# Altium schematic symbol library Switch.SchLib: 116 symbols (part 1 of 2)
Pins are listed as number, name and electrical type; pins without a type are passive.

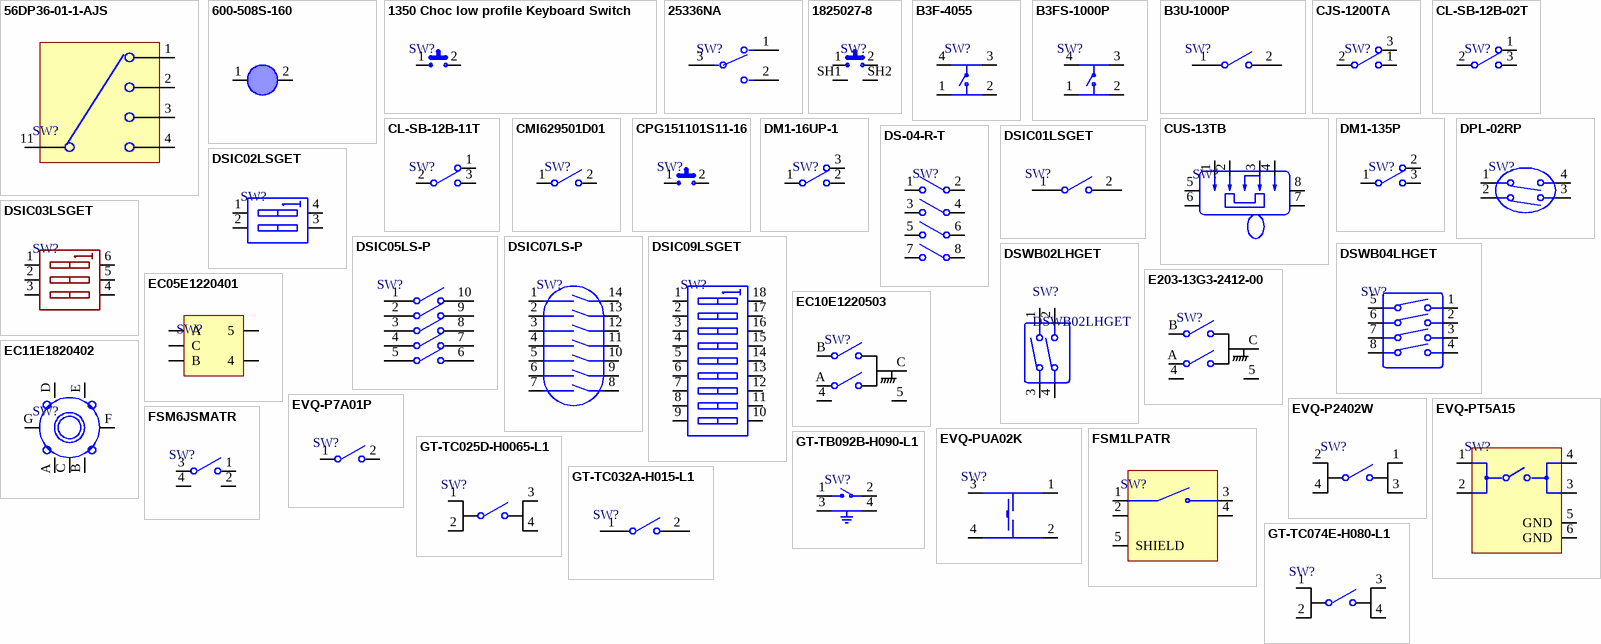
[diagram p0: symbols 56DP36-01-1-AJS to GT-TC074E-H080-L1]

## 56DP36-01-1-AJS
designator SW?
2 - 10 positions 36deg Rotary Switch; 115 V ac; 30 V dc; 200 mA; Shaft; Manufacturer: Grayhill; Manufacturer Part Number: 56DP36-01-1-AJS; Item Type: Rotary Switches; Supplier: Digikey; Supplier Part Number: 56DP36-01-1-AJS-ND; RoHS: Yes; Pricing: 1=24.84, 5=21.334, 10=19.997, 25=18.3256, 50=17.156, 100=16.0977, 250=14.76088, 500=14.4824 (USD); ComponentLink1URL: https://datasheet.ciiva.com/2887/rotary-56-2887598.pdf?src-supplier=Digikey; ComponentLink1Description: https://datasheet.ciiva.com/2887/rotary-56-2887598.pdf?src-supplier=Digikey
footprint 56DP36-01-1-AJS
pins: 1, 2, 3, 4, 11 COMMON

## 600-508S-160
designator J?
Circular 160gf 0.25mm - Metal Dome Pot ROHS; Manufacturer: HYP; Manufacturer Part Number: 600-508S-160; Package: Custom; LCSC Part Number: C256262; Item Type: Metal Dome Pot; ComponentLink1Description: LCSC; ComponentLink1URL: https://www.lcsc.com/product-detail/Metal-span-style-background-color-ff0-Dome-span-Pot_HYP-Hongyuan-Precision-600-508S-160_C256262.html
footprint 600-508S-160
pins: 1, 2

## 1350 Choc low profile Keyboard Switch
designator SW?
Mechnical Keyboard Switches Hot-swap PCB Socket DIY for 1350 Choc Low Profile Keyboard Switch; Manufacturer: Kailh; Manufacturer Part Number: 1350 Choc low profile Keyboard Switch; Package: -; LCSC Part Number: -; Item Type: Keyboard Switch; ComponentLink1Description: LCSC; ComponentLink1URL: *
footprint 1350 Choc low profile Keyboard Switch
pins: 1, 2

## 25336NA
designator SW?
SWITCH SLIDE SPDT 4A 125V; Manufacturer: APEM; Manufacturer Part Number: 25336NA; Item Type: Slide Switches; Actuator Length: 2.3mm; Actuator Material: Glass, Glass fibre, Nylon, Polyamide; Contact Current Rating: 2A; Contact Resistance: 10mΩ; Contact Voltage Rating (AC): 250V; Current Rating: 1A; Dielectric Material: Thermoplastic; Electrical Life: 10kcycles; Insulation Resistance: 1GΩ; Max Voltage Rating (DC): 30V; Mechanical Life: 20kcycles; Number of Positions: 2; Sealable: EPOXY TERMINAL SEALED; Switch Function: On-On; Switch Travel: 4mm; Supplier: Arrow Electronics; Supplier Part Number: 25336NA; RoHS: Compliant; Stock: 4; Pricing: 1=2.2457 (USD); Contact Material: Silver; Contact Plating: Silver; Depth: 9.8mm; Height: 8.1mm; Length: 14.1mm; Life (Cycles): 10kcycles; Lifecycle Status: Production; Max Current Rating: 1A; Max Operating Temperature: 85°C; Max Voltage Rating (AC): 250V; Min Operating Temperature: -40°C; Mounting Technology: Through Hole; Orientation: Right Angle; Packaging: Bulk; REACH SVHC: Yes; Terminal Material: Silver; Termination: PC Pin; Throw Configuration: SPDT; Voltage Rating (AC): 125V; Voltage Rating (DC): 30V; Width: 14mm; ComponentLink1URL: https://datasheet.octopart.com:443/25336NA-APEM-datasheet-13521368.pdf?src-supplier=IHS; ComponentLink1Description: https://datasheet.octopart.com:443/25336NA-APEM-datasheet-13521368.pdf?src-supplier=IHS; ComponentLink2URL: https://datasheet.octopart.com:443/25336NA-APEM-datasheet-41567066.pdf?src-supplier=Master+Electronics; ComponentLink2Description: https://datasheet.octopart.com:443/25336NA-APEM-datasheet-41567066.pdf?src-supplier=Master+Electronics; ComponentLink3URL: https://datasheet.octopart.com:443/25336NA-APEM-datasheet-178036094.pdf?src-supplier=TME; ComponentLink3Description: https://datasheet.octopart.com:443/25336NA-APEM-datasheet-178036094.pdf?src-supplier=TME; ComponentLink4URL: https://datasheet.octopart.com:443/25336NA-APEM-datasheet-10337772.pdf?src-supplier=Newark; ComponentLink4Description: https://datasheet.octopart.com:443/25336NA-APEM-datasheet-10337772.pdf?src-supplier=Newark; ComponentLink5URL: https://datasheet.octopart.com:443/25336NA-APEM-datasheet-23707371.pdf?src-supplier=Electro+Sonic; ComponentLink5Description: https://datasheet.octopart.com:443/25336NA-APEM-datasheet-23707371.pdf?src-supplier=Electro+Sonic; ComponentLink6URL: https://datasheet.octopart.com:443/25336NA-APEM-datasheet-165057810.pdf?src-supplier=Burklin+Elektronik; ComponentLink6Description: https://datasheet.octopart.com:443/25336NA-APEM-datasheet-165057810.pdf?src-supplier=Burklin+Elektronik; ComponentLink7URL: https://datasheet.octopart.com:443/25336NA-APEM-datasheet-491718.pdf?src-supplier=Factory+Futures; ComponentLink7Description: https://datasheet.octopart.com:443/25336NA-APEM-datasheet-491718.pdf?src-supplier=Factory+Futures
footprint 25336NA
pins: 1, 2, 3 Common

## 1825027-8
designator SW?
50mA Lying SPST 24V Plugin Tactile Switches ROHS; Manufacturer: TE Connectivity; Manufacturer Part Number: 1825027-8; Supplier 1: Arrow Electronics; RoHS: Yes; Category: Pushbutton Switches; Stock 1: 178529; Pricing 1: 1=0.13800, 10=0.13370, 25=0.12590, 100=0.10940, 250=0.10570, 500=0.09520, 1000=0.07320, 2500=0.07250, 5000=0.06250 (USD); ComponentLink1URL: https://datasheet.ciiva.com/30072/eng-cd-1825027-f-30072833.pdf?src-supplier=Onlinecomponents.com; ComponentLink1Description: https://datasheet.ciiva.com/30072/eng-cd-1825027-f-30072833.pdf?src-supplier=Onlinecomponents.com; ComponentLink2URL: https://datasheet.ciiva.com/16393/1825027-8-16393346.pdf?src-supplier=Future+Electronics; ComponentLink2Description: https://datasheet.ciiva.com/16393/1825027-8-16393346.pdf?src-supplier=Future+Electronics; ComponentLink3URL: https://datasheet.ciiva.com/8164/eng-cd-1825027-g4-8164921.pdf?src-supplier=Avnet; ComponentLink3Description: https://datasheet.ciiva.com/8164/eng-cd-1825027-g4-8164921.pdf?src-supplier=Avnet; Supplier Part Number 1: 1825027-8; Item Type: Tactile Switch
footprint 1825027-8
pins: 1, 2, SH1 GND, SH2 GND

## B3F-4055
designator SW?
SWITCH TACTILE SPST-NO 0.05A 24V; Manufacturer: Omron; Manufacturer Part Number: B3F-4055; Item Type: Tactile Switche; Number of Positions: 2NUMBER; Supplier: Avnet; Supplier Part Number: 36K1872; RoHS: Yes; Stock: 55; Pricing: 1=0.617, 10=0.574, 25=0.55, 50=0.525, 100=0.501 (USD); Color: 54Colour; Lead Free: 5697LeadFree; ComponentLink1URL: https://datasheet.ciiva.com/27056/2086688-27056647.pdf?src-supplier=Jameco; ComponentLink1Description: https://datasheet.ciiva.com/27056/2086688-27056647.pdf?src-supplier=Jameco; ComponentLink2URL: https://datasheet.ciiva.com/5283/b3f-0811-26083-5283663.pdf?src-supplier=Mouser; ComponentLink2Description: https://datasheet.ciiva.com/5283/b3f-0811-26083-5283663.pdf?src-supplier=Mouser; ComponentLink3URL: https://datasheet.ciiva.com/1532/611570-1532596.pdf?src-supplier=Element14; ComponentLink3Description: https://datasheet.ciiva.com/1532/611570-1532596.pdf?src-supplier=Element14; ComponentLink4URL: https://datasheet.ciiva.com/16154/en-b3f-16154911.pdf?src-supplier=Onlinecomponents.com; ComponentLink4Description: https://datasheet.ciiva.com/16154/en-b3f-16154911.pdf?src-supplier=Onlinecomponents.com; ComponentLink5URL: https://datasheet.ciiva.com/2900/b3f-0811-2900013.pdf?src-supplier=Digikey; ComponentLink5Description: https://datasheet.ciiva.com/2900/b3f-0811-2900013.pdf?src-supplier=Digikey; ComponentLink6URL: https://datasheet.ciiva.com/30212/en-b3f-30212214.pdf?src-supplier=Onlinecomponents.com; ComponentLink6Description: https://datasheet.ciiva.com/30212/en-b3f-30212214.pdf?src-supplier=Onlinecomponents.com; LCSC Part Number: C84931
footprint B3F-4055
pins: 1, 2, 3, 4

## B3FS-1000P
designator SW?
SWITCH TACTILE SPST-NO 0.05A 24V; Manufacturer: Omron; Manufacturer Part Number: B3FS-1000P; Item Type: Tactile Switches; Number of Positions: 2NUMBER; Supplier: Digikey; LCSC Part Number: C271750; RoHS: Yes; Stock: 40780; Pricing: 1=0.65, 10=0.576, 25=0.524, 100=0.4714, 250=0.45424, 500=0.43708, 1000=0.392 (USD); Material: 4239ConductorMaterial; Color: 46Colour; Lead Free: 5697LeadFree; ComponentLink1URL: https://datasheet.ciiva.com/1532/en-b3fs-1532627.pdf?src-supplier=Element14; ComponentLink1Description: https://datasheet.ciiva.com/1532/en-b3fs-1532627.pdf?src-supplier=Element14; ComponentLink2URL: https://datasheet.ciiva.com/16154/en-b3fs-16154936.pdf?src-supplier=Onlinecomponents.com; ComponentLink2Description: https://datasheet.ciiva.com/16154/en-b3fs-16154936.pdf?src-supplier=Onlinecomponents.com; ComponentLink3URL: https://datasheet.ciiva.com/2899/en-b3fs-2899744.pdf?src-supplier=Digikey; ComponentLink3Description: https://datasheet.ciiva.com/2899/en-b3fs-2899744.pdf?src-supplier=Digikey; ComponentLink4URL: https://datasheet.ciiva.com/2899/en-b3fs-2899745.pdf?src-supplier=Digikey; ComponentLink4Description: https://datasheet.ciiva.com/2899/en-b3fs-2899745.pdf?src-supplier=Digikey; ComponentLink5URL: https://datasheet.ciiva.com/2899/en-b3fs-2899746.pdf?src-supplier=Digikey; ComponentLink5Description: https://datasheet.ciiva.com/2899/en-b3fs-2899746.pdf?src-supplier=Digikey; ComponentLink6URL: https://datasheet.ciiva.com/26827/getdatasheetpartid-131603-26827237.pdf?src-supplier=Verical; ComponentLink6Description: https://datasheet.ciiva.com/26827/getdatasheetpartid-131603-26827237.pdf?src-supplier=Verical; ComponentLink7URL: https://datasheet.ciiva.com/30214/b3fs-0714-30214221.pdf?src-supplier=Onlinecomponents.com; ComponentLink7Description: https://datasheet.ciiva.com/30214/b3fs-0714-30214221.pdf?src-supplier=Onlinecomponents.com
footprint B3FS-1000P
pins: 1, 2, 3, 4

## B3U-1000P
designator SW?
SWITCH TACTILE SPST-NO 0.05A 12V; Manufacturer: Omron; Manufacturer Part Number: B3U-1000P; Mechanical Life: 200000Cycles; Operating Force: 1.5N; Throw Configuration: SPST; Current Rating: 50mA; Contact Resistance: 100mR; Illumination Type: Non-Illuminated,Illuminated; Switch Travel: 0.15mm; Switch Function: Off-Mom; Actuator Type: Standard; Actuator Length: 0.4mm; Ratings: Dust Proof,IP40; ComponentLink1URL: http://www.farnell.com/datasheets/60838.pdf?src-supplier=Farnell; ComponentLink1Description: http://www.farnell.com/datasheets/60838.pdf?src-supplier=Farnell; ComponentLink2URL: http://www.farnell.com/datasheets/60838.pdf?src-supplier=Element14; ComponentLink2Description: http://www.farnell.com/datasheets/60838.pdf?src-supplier=Element14; ComponentLink3URL: https://omronfs.omron.com/en_US/ecb/products/pdf/en-b3u.pdf?src-supplier=Digi-Key; ComponentLink3Description: https://omronfs.omron.com/en_US/ecb/products/pdf/en-b3u.pdf?src-supplier=Digi-Key; ComponentLink4URL: http://www.omron.com/ecb/products/pdf/en-b3u.pdf?src-supplier=Digi-Key; ComponentLink4Description: http://www.omron.com/ecb/products/pdf/en-b3u.pdf?src-supplier=Digi-Key; ComponentLink5URL: https://www.distrelec.biz/Web/Downloads/he/et/B3U_eng_datasheet.pdf?mime=application%2Fpdf&src-supplier=Distrelec; ComponentLink5Description: https://www.distrelec.biz/Web/Downloads/he/et/B3U_eng_datasheet.pdf?mime=application%2Fpdf&src-supplier=Distrelec; ComponentLink6URL: http://www.onlinecomponents.com/productFiles/mf-OM/en-b3u.pdf?src-supplier=Onlinecomponents.com; ComponentLink6Description: http://www.onlinecomponents.com/productFiles/mf-OM/en-b3u.pdf?src-supplier=Onlinecomponents.com; Supplier 1: Digi-Key; Stock 1: 116454; Pricing 1: 1=1, 10=0.961, 25=0.9064, 50=0.7976, 100=0.7251, 250=0.68888, 500=0.67074, 1000=0.52571 (USD); Mount: Surface Mount; Weight: 0.000776oz; Contact Material: Silver; Min Operating Temperature: -25°C; Max Operating Temperature: 70°C; Packaging: Tape and Reel; Voltage Rating (DC): 12V; Package Quantity: 1; Max Current Rating: 50mA; Termination: SMD/SMT; Orientation: Straight; Max Voltage Rating (DC): 12V; Electrical Life: 200000Cycles; Insulation Resistance: 100MR; Contact Current Rating: 50mA; Length: 4mm; Height: 1.2mm; Depth: 2.5mm; Width: 3mm; REACH SVHC: Unknown; Lead Free: Lead Free; ComponentLink7URL: https://www.verical.com/server-webapp/html/getDatasheet?partID=552554&src-supplier=Verical; ComponentLink7Description: https://www.verical.com/server-webapp/html/getDatasheet?partID=552554&src-supplier=Verical; ComponentLink8URL: http://www.farnell.com/datasheets/1685550.pdf?src-supplier=Element14; ComponentLink8Description: http://www.farnell.com/datasheets/1685550.pdf?src-supplier=Element14; ComponentLink9URL: http://www.farnell.com/datasheets/2610940.pdf?src-supplier=Farnell; ComponentLink9Description: http://www.farnell.com/datasheets/2610940.pdf?src-supplier=Farnell; ComponentLink10URL: https://www.alliedelec.com/m/d/4c8a9ef82804fc3c241a13c1e298fd73.pdf?src-supplier=Allied+Electronics; ComponentLink10Description: https://www.alliedelec.com/m/d/4c8a9ef82804fc3c241a13c1e298fd73.pdf?src-supplier=Allied+Electronics; Supplier Part Number 1: SW1020DKR-ND; LCSC Part Number: C231329; Item Type: Switch
footprint B3U-1000P (SWITCH TACTILE SPST-NO 0.05A 12V)
pins: 1, 2

## CJS-1200TA
designator SW?
SWITCH SLIDE SPDT 100MA 6V; Manufacturer: Nidec Copal; Manufacturer Part Number: CJS-1200TA; Item Type: DIP Switches; Actuator Material: Nylon,Polyamide; Electrical Life: 200Cycles; Max Voltage Rating (DC): 24V; Switch Function: On-On; Switch Travel: 0.6mm; Operating Force: 600gf; Supplier: Digikey; RoHS: Yes; Stock: 28637; Pricing: 1=1.12, 10=0.915, 25=0.8424, 100=0.7418, 250=0.68124, 500=0.63826 (USD); Mounting Technology: Surface Mount; Contact Material: Copper Alloy; Contact Plating: Gold; Min Operating Temperature: -40°C; Max Operating Temperature: 85°C; Packaging: Tape and Reel; Throw Configuration: SPDT; Voltage Rating (DC): 6V; Termination: J-Hook; Series: CJS; Orientation: Vertical; Contact Current Rating: 100mA; Radiation Hardening: No; RoHS Compliant: Yes; Lead Free: Lead Free; ComponentLink1URL: https://datasheet.ciiva.com/2864/cjs-2864477.pdf?src-supplier=Digikey; ComponentLink1Description: https://datasheet.ciiva.com/2864/cjs-2864477.pdf?src-supplier=Digikey; ComponentLink2URL: https://datasheet.ciiva.com/2864/cjs-2864476.pdf?src-supplier=Digikey; ComponentLink2Description: https://datasheet.ciiva.com/2864/cjs-2864476.pdf?src-supplier=Digikey; ComponentLink3URL: https://datasheet.ciiva.com/2864/cjs-2864478.pdf?src-supplier=Digikey; ComponentLink3Description: https://datasheet.ciiva.com/2864/cjs-2864478.pdf?src-supplier=Digikey
footprint CJS-1200TA
pins: 1 NC, 2 COM, 3 NO

## CL-SB-12B-02T
designator SW?
SWITCH SLIDE SPDT 200MA 12V; Manufacturer: Nidec Copal; Manufacturer Part Number: CL-SB-12B-02T; Actuator Material: Nylon,Polyamide; Operating Force: 153gf; Electrical Life: 10000Cycles; Switch Travel: 2mm; Switch Function: On-On; Actuator Type: Standard; Item Type: Slide Switche; Supplier: Digikey; Supplier Part Number: 563-1319-1-ND; RoHS: Yes; Category: Slide Switches; Stock: 2449; Pricing: 1=1.67, 10=1.62, 25=1.4732, 100=1.2799, 250=1.15988 (USD); Mounting Technology: Surface Mount; Contact Material: Copper; Contact Plating: Gold; Min Operating Temperature: -40°C; Max Operating Temperature: 85°C; Packaging: Cut Tape; Voltage Rating (DC): 12V; Termination: Gull Wing; Throw Configuration: SPDT; Series: CL-SB; Actuator Length: 2mm; RoHS Compliant: Yes; ComponentLink1URL: https://datasheet.ciiva.com/6461/cl-sb-6461724.pdf?src-supplier=Digikey; ComponentLink1Description: https://datasheet.ciiva.com/6461/cl-sb-6461724.pdf?src-supplier=Digikey; ComponentLink2URL: https://datasheet.ciiva.com/6461/cl-sb-6461725.pdf?src-supplier=Digikey; ComponentLink2Description: https://datasheet.ciiva.com/6461/cl-sb-6461725.pdf?src-supplier=Digikey; ComponentLink3URL: https://datasheet.ciiva.com/6461/cl-sb-6461726.pdf?src-supplier=Digikey; ComponentLink3Description: https://datasheet.ciiva.com/6461/cl-sb-6461726.pdf?src-supplier=Digikey; LCSC Part Number: C2921648
footprint CL-SB-12B-02T
pins: 1 NC, 2 COM, 3 NO

## CL-SB-12B-11T
designator SW?
SWITCH SLIDE SPDT 200MA 12V; Manufacturer: Nidec Copal; Manufacturer Part Number: CL-SB-12B-11T; Item Type: Slide Switches; Actuator Material: Nylon,Polyamide; Operating Force: 153gf; Electrical Life: 10000Cycles; Switch Travel: 2mm; Switch Function: On-On; Actuator Type: Standard; Supplier: Digikey; Supplier Part Number: 563-1320-1-ND; RoHS: Yes; Stock: 4269; Pricing: 1=1.26, 10=1.212, 25=1.1392, 100=0.9841, 250=0.89688 (USD); Mounting Technology: Surface Mount; Contact Material: Copper; Contact Plating: Silver; Min Operating Temperature: -40°C; Max Operating Temperature: 85°C; Packaging: Cut Tape; Voltage Rating (DC): 12V; Termination: Gull Wing; Throw Configuration: SPDT; Series: CL-SB; Actuator Length: 2mm; RoHS Compliant: Yes; ComponentLink1URL: https://datasheet.ciiva.com/6462/cl-sb-6462038.pdf?src-supplier=Digikey; ComponentLink1Description: https://datasheet.ciiva.com/6462/cl-sb-6462038.pdf?src-supplier=Digikey
footprint CL-SB-12B-11T
pins: 1 NC, 2 COM, 3 NO

## CMI629501D01
designator SW?
Plugin Tactile Switches ROHS; Manufacturer: Kailh; Manufacturer Part Number: CMI629501D01; Package: Plugin; LCSC Part Number: C400267; Item Type: Tactile Switch; ComponentLink1Description: LCSC; ComponentLink1URL: https://www.lcsc.com/product-detail/Tactile-Switches_span-style-background-color-ff0-Kailh-span-CMI629501D01_C400267.html
footprint CMI629501D01
pins: 1, 2

## CPG151101S11-16
designator SW?
SMD,14.5x5.9mm Mechanical Keyboard Shaft ROHS; Manufacturer: HanElectricity; Manufacturer Part Number: CPG151101S11-16; Package: SMD,14.5x5.9mm; LCSC Part Number: C41430893; Item Type: Mechanical Keyboard Shaft; ComponentLink1Description: LCSC; ComponentLink1URL: https://www.lcsc.com/product-detail/Mechanical-Keyboard-Shaft_HanElectricity-CPG151101S11-16_C41430893.html?s_z=n_%2520CPG151101S11-16
footprint CPG151101S11-16
pins: 1, 2

## CUS-13TB
designator SW?
SWITCH SLIDE SP3T 300MA 4V; Manufacturer: Nidec Copal; Manufacturer Part Number: CUS-13TB; Item Type: Slide Switches; Actuator Material: Nylon,Polyamide; Max Voltage Rating (DC): 20V; Electrical Life: 10000Cycles; Switch Travel: 1.5mm; Switch Function: On-On-On; Actuator Type: Standard; Supplier: Rs; LCSC Part Number: C2921740; RoHS: Yes; Stock: 2445; Mounting Technology: Surface Mount; Contact Plating: Gold; Contact Material: Copper Alloy; Min Operating Temperature: -20°C; Max Operating Temperature: 70°C; Voltage Rating (DC): 4V; Packaging: Tape and Reel; Termination: Gull Wing; Throw Configuration: SP3T; Orientation: Right Angle; Series: CUS; Actuator Length: 1.5mm; Radiation Hardening: No; RoHS Compliant: Yes; ComponentLink1URL: https://datasheet.ciiva.com/2889/cus-2889142.pdf?src-supplier=Digikey; ComponentLink1Description: https://datasheet.ciiva.com/2889/cus-2889142.pdf?src-supplier=Digikey; ComponentLink2URL: https://datasheet.ciiva.com/2889/cus-2889143.pdf?src-supplier=Digikey; ComponentLink2Description: https://datasheet.ciiva.com/2889/cus-2889143.pdf?src-supplier=Digikey; ComponentLink3URL: https://datasheet.ciiva.com/2889/cus-2889144.pdf?src-supplier=Digikey; ComponentLink3Description: https://datasheet.ciiva.com/2889/cus-2889144.pdf?src-supplier=Digikey
footprint CUS-13TB
pins: 1, 2, 3, 4, 5, 6, 7, 8

## DM1-16UP-1
designator SW?
1A 30V SPDT Micro Switch 1000000 times Plugin Microswitches ROHS; Manufacturer: XKB Connectivity; Manufacturer Part Number: DM1-16UP-1; Package: Plugin; LCSC Part Number: C405950; Item Type: Switch; ComponentLink1Description: LCSC; ComponentLink1URL: https://www.lcsc.com/product-detail/Microswitches_XKB-Connectivity-DM1-16UP-1_C405950.html
footprint DM1-16UP-1
pins: 1 COM, 2 NO, 3 NC

## DM1-135P
designator SW?
1A 30V Single Pole Double Throw (SPDT) 1,000,000 Times Plugin Limit Switches ROHS; Manufacturer: XKB Connectivity; Manufacturer Part Number: DM1-135P; Item Type: Switch; Package: Plugin; LCSC Part Number: C480264; ComponentLink1Description: LCSC; ComponentLink1URL: https://www.lcsc.com/product-detail/Limit-Switches_XKB-Connection-DM1-135P_C480264.html
footprint DM1-135P
pins: 1 COM, 2 NC, 3 NO

## DPL-02RP
designator SW?
2 positions SPST 24V 25mA Red 3000 Times Piano Key Plugin DIP Switches ROHS; Manufacturer: XKB Connection; Manufacturer Part Number: DPL-02RP; Item Type: SMD-4P; Package: Plugin; LCSC Part Number: C319071; ComponentLink1Description: LCSC; ComponentLink1URL: https://www.lcsc.com/product-detail/DIP-Switches_XKB-Connection-DPL-02RP_C319071.html
footprint DPL-02RP
pins: 1, 2, 3, 4

## DS-04-R-T
designator SW?
4Bit SPST 24V Red 25mA 3000次 Plugin DIP Switches ROHS; Manufacturer: kangshen; Manufacturer Part Number: 208-4; Package: Plugin; LCSC Part Number: C5123702; Item Type: DIP Switch; ComponentLink1Description: LCSC; ComponentLink1URL: https://www.lcsc.com/product-detail/DIP-Switches_CTS-Electronic-Components-208-4_C3012341.html
footprint DS-04-R-T
pins: 1, 2, 3, 4, 5, 6, 7, 8

## DSIC01LSGET
designator SW?
SPST Black Flat dial, raised type 2.54mm 1 SMD,2.5x6mm DIP Switches ROHS; Manufacturer: DongGuan; Manufacturer Part Number: DSIC01LSGET; Item Type: Switch; Package: SMD,2.5x6mm; LCSC Part Number: C54948; ComponentLink1Description: LCSC; ComponentLink1URL: https://www.lcsc.com/product-detail/DIP-Switches_DongGuan-KINGTEK-Industrial-Co-LTD-DSIC01LSGET_C54948.html
footprint DSIC01LSGET
pins: 1, 2

## DSIC02LSGET
designator SW?
2 positions SPST Black Flat Toggle, Raised Style SMD-4P,5.1x6mm DIP Switches ROHS; Manufacturer: DongGuan; Manufacturer Part Number: DSIC02LSGET; Item Type: Switch; Package: SMD-4P,5.1x6mm; LCSC Part Number: C54949; ComponentLink1Description: LCSC; ComponentLink1URL: https://www.lcsc.com/product-detail/DIP-Switches_DongGuan-KINGTEK-Industrial-Co-LTD-DSIC02LSGET_C54949.html?s_z=n_DSIC02LSGET
footprint DSIC02LSGET
pins: 1 A1, 2 A2, 3 A3, 4 B3

## DSIC03LSGET
designator SW?
3 positions SPST Black Flat Toggle, Raised Style SMD-6P,6x7.6mm DIP Switches ROHS; Manufacturer: DongGuan KINGTEK Industrial Co.,LTD; Manufacturer Part Number: DSIC03LSGET; Package: SMD-6P,6x7.6mm; LCSC Part Number: C57453; Item Type: DIP Switches; ComponentLink1Description: LCSC; ComponentLink1URL: https://www.lcsc.com/product-detail/DIP-Switches_DongGuan-KINGTEK-Industrial-Co-LTD-DSIC03LSGET_C57453.html
footprint DSIC03LSGET
pins: 1 A1, 2 A2, 3 A3, 4 B3, 5 B2, 6 B1

## DSIC05LS-P
designator SW?
Gull Wing SPST 24V 25mA Black -20℃~+70℃ 3000 Flat dial, raised type 2.54mm 5 SMD-10P,6x12.6mm DIP Switches ROHS; Manufacturer: XKB Connectivity; Manufacturer Part Number: DSIC05LS-P; Item Type: Switch; LCSC Part Number: C319036; ComponentLink1Description: LCSC; ComponentLink1URL: https://www.lcsc.com/product-detail/DIP-Switches_XKB-Connectivity-DSIC05LS-P_C319036.html
footprint DSIC05LS-P_
pins: 1, 2, 3, 4, 5, 6, 7, 8, 9, 10

## DSIC07LS-P
designator SW?
7Bit SPST 24V 25mA Black 3千次 Slide (Standard),凸起式 SMD-14P,6x17.8mm DIP Switches ROHS; Manufacturer: XKB Connection; Manufacturer Part Number: DSIC07LS-P; Package: SMD-14P,6x17.8mm; LCSC Part Number: C319033; Item Type: DIP Switche; ComponentLink1Description: LCSC; ComponentLink1URL: https://www.lcsc.com/product-detail/DIP-Switches_XKB-Connection-DSIC07LS-P_C319033.html
footprint DSIC07LS-P
pins: 1, 2, 3, 4, 5, 6, 7, 8, 9, 10, 11, 12, 13, 14

## DSIC09LSGET
designator SW?
9Bit SPST Black Slide (Standard),凸起式 SMD-18P,6x22.9mm DIP Switches ROHS; Manufacturer: DongGuan; Manufacturer Part Number: DSIC09LSGET; Package: SMD-18P,6x22.9mm; LCSC Part Number: C57455; Item Type: DIP Switche; ComponentLink1Description: LCSC; ComponentLink1URL: https://www.lcsc.com/product-detail/DIP-Switches_DongGuan-KINGTEK-Industrial-Co-LTD-DSIC09LSGET_C57455.html
footprint DSIC09LSGET
pins: 1 A1, 2 A2, 3 A3, 4 A4, 5 A5, 6 A6, 7 A7, 8 A8, 9 A9, 10 B9, 11 B8, 12 B7, 13 B6, 14 B5, 15 B4, 16 B3, 17 B2, 18 B1

## DSWB02LHGET
designator SW?
2Bit SPST Red Slide (Standard),DIP Switches ROHS; Manufacturer: DongGuan KINGTEK Industrial Co.,LTD; Item Type: Switch; Manufacturer Part Number: DSWB02LHGET; Package: THT; LCSC Part Number: C99421; ComponentLink1Description: LCSC; ComponentLink1URL: https://www.lcsc.com/product-detail/DIP-Switches_DongGuan-KINGTEK-Industrial-Co-LTD-DSWB02LHGET_C99421.html
footprint DSWB02LHGET
pins: 1, 2, 3, 4

## DSWB04LHGET
designator SW?
4Bit SPST Red Slide (Standard) Plugin DIP Switches ROHS; Manufacturer: DongGuan; Manufacturer Part Number: DSWB04LHGET; Package: Plugin; LCSC Part Number: C99418; Item Type: DIP Switche; ComponentLink1Description: LCSC; ComponentLink1URL: https://www.lcsc.com/product-detail/DIP-Switches_DongGuan-KINGTEK-Industrial-Co-LTD-DSWB04LHGET_C99418.html
footprint DSWB04LHGET
pins: 1, 2, 3, 4, 5, 6, 7, 8

## E203-13G3-2412-00
designator SW?
ROTARY ENCODER MECHANICAL; Manufacturer Part Number: E203-13G3-2412-00; ComponentLink1Description: Taobao; ComponentLink1URL: https://item.taobao.com/item.htm?id=617414303945
footprint E203-13G3-2412-00
pins: 4, 5, A, B, C

## EC05E1220401
designator SW?
SMD Rotary Encoders ROHS; Manufacturer: ALPSALPINE; Manufacturer Part Number: EC05E1220401; Package: SMD; LCSC Part Number: C116648; Item Type: Rotary Encoders; ComponentLink1Description: LCSC; ComponentLink1URL: https://www.lcsc.com/product-detail/Rotary-Encoders_ALPSALPINE-EC05E1220401_C116648.html?s_z=n_EC05E1220401
footprint EC05E1220401
pins: 4, 5, A, B, C

## EC10E1220503
designator SW?
ROTARY ENCODER MECHANICAL 12PPR; Manufacturer: Alps Electric; Manufacturer Part Number: EC10E1220503; Supplier: Mouser; Supplier Part Number: 688-EC10E1220503; RoHS: Yes; Stock: 2306; Pricing: 1=0.96, 10=0.762, 50=0.762, 100=0.413, 1000=0.413, 10000=0.412 (USD); ComponentLink1URL: https://datasheet.ciiva.com/11807/0900766b80f4c220-11807899.pdf?src-supplier=Rs; ComponentLink1Description: https://datasheet.ciiva.com/11807/0900766b80f4c220-11807899.pdf?src-supplier=Rs; ComponentLink2URL: https://datasheet.ciiva.com/16205/817ec10e-16205174.pdf?src-supplier=Onlinecomponents.com; ComponentLink2Description: https://datasheet.ciiva.com/16205/817ec10e-16205174.pdf?src-supplier=Onlinecomponents.com; LCSC Part Number: C110291; Item Type: Rotary Encoder
footprint EC10E1220503
pins: 4, 5, A, B, C

## EC11E1820402
designator SW?
METAL SHAFT ENCODERS; Manufacturer: Alps Electric; Manufacturer Part Number: EC11E1820402; Number of Positions: 36NUMBER; Supplier: Digikey; LCSC Part Number: C361167; RoHS: Yes; Item Type: Encoders; Stock: 643; Pricing: 1=4.42, 5=3.992, 10=3.731, 25=3.4196, 40=3.1905, 80=3.00238, 230=2.74883, 440=2.57702, 945=2.4134 (USD); Lead Free: 5697LeadFree; ComponentLink1URL: https://datasheet.ciiva.com/11807/0900766b80f4c221-11807942.pdf?src-supplier=Rs; ComponentLink1Description: https://datasheet.ciiva.com/11807/0900766b80f4c221-11807942.pdf?src-supplier=Rs; ComponentLink2URL: https://datasheet.ciiva.com/1310/1837001-1310650.pdf?src-supplier=Element14; ComponentLink2Description: https://datasheet.ciiva.com/1310/1837001-1310650.pdf?src-supplier=Element14; ComponentLink3URL: https://datasheet.ciiva.com/32416/03584604-32416390.pdf?src-supplier=Distrelec; ComponentLink3Description: https://datasheet.ciiva.com/32416/03584604-32416390.pdf?src-supplier=Distrelec; ComponentLink4URL: https://datasheet.ciiva.com/16204/878ec11-16204694.pdf?src-supplier=Onlinecomponents.com; ComponentLink4Description: https://datasheet.ciiva.com/16204/878ec11-16204694.pdf?src-supplier=Onlinecomponents.com
footprint EC11E1820402
pins: A, B, C, D, E, F, G

## EVQ-P7A01P
designator SW?
SWITCH TACTILE SPST-NO 0.05A 12V; Manufacturer: Panasonic; Manufacturer Part Number: EVQ-P7A01P; Mechanical Life: 100000Cycles; Actuator Color: Black; Throw Configuration: SPST; Operating Force: 2.2N; Contact Resistance: 500mR; Illumination Type: Non-Illuminated; Contact Current Rating: 50mA; Switch Travel: 0.2mm; Switch Function: Off-Mom; Actuator Length: 0.65mm; Item Type: Tactile Switch; Supplier: Mouser; Supplier Part Number: 667-EVQP7A01P; RoHS: Yes; Category: Tactile Switches; Stock: 47904; Pricing: 1=0.28, 10=0.258, 50=0.258, 100=0.213, 1000=0.169, 10000=0.133 (USD); Mounting Technology: Surface Mount; Case/Package: SMD/SMT; Min Operating Temperature: -20°C; Max Operating Temperature: 70°C; Max Voltage Rating (DC): 12V; Packaging: Tape and Reel; Package Quantity: 5000; Termination: Gull Wing; Electrical Life: 100000Cycles; Orientation: Right Angle; Series: EVQP7; Radiation Hardening: No; Lead Free: Lead Free; Reach SVHC Compliant: Unknown; ComponentLink1URL: http://uk.rs-online.com/webdocs/13a5/0900766b813a5dbe.pdf?src-supplier=Rs; ComponentLink1Description: http://uk.rs-online.com/webdocs/13a5/0900766b813a5dbe.pdf?src-supplier=Rs; ComponentLink2URL: http://datasheet.octopart.com/EVQ-P7A01P-Panasonic-datasheet-98950114.pdf?src-supplier=Rs; ComponentLink2Description: http://datasheet.octopart.com/EVQ-P7A01P-Panasonic-datasheet-98950114.pdf?src-supplier=Rs; ComponentLink3URL: https://www3.panasonic.biz/ac/e_download/control/switch/light-touch/catalog/sw_lt_eng_3529s_side.pdf?src-supplier=Verical; ComponentLink3Description: https://www3.panasonic.biz/ac/e_download/control/switch/light-touch/catalog/sw_lt_eng_3529s_side.pdf?src-supplier=Verical; ComponentLink4URL: https://www3.panasonic.biz/ac/e_download/control/switch/light-touch/catalog/sw_lt_eng_3529s_side.pdf?src-supplier=Onlinecomponents.com; ComponentLink4Description: https://www3.panasonic.biz/ac/e_download/control/switch/light-touch/catalog/sw_lt_eng_3529s_side.pdf?src-supplier=Onlinecomponents.com; ComponentLink5URL: https://www3.panasonic.biz/ac/e_download/control/switch/light-touch/catalog/sw_lt_eng_3529s_side.pdf?src-supplier=Arrow+Electronics; ComponentLink5Description: https://www3.panasonic.biz/ac/e_download/control/switch/light-touch/catalog/sw_lt_eng_3529s_side.pdf?src-supplier=Arrow+Electronics; ComponentLink6URL: https://www3.panasonic.biz/ac/e_download/control/switch/light-touch/catalog/sw_lt_eng_3529s_side.pdf?src-supplier=Avnet; ComponentLink6Description: https://www3.panasonic.biz/ac/e_download/control/switch/light-touch/catalog/sw_lt_eng_3529s_side.pdf?src-supplier=Avnet; ComponentLink7URL: http://www.farnell.com/datasheets/1790605.pdf?src-supplier=Newark; ComponentLink7Description: http://www.farnell.com/datasheets/1790605.pdf?src-supplier=Newark; ComponentLink8URL: https://datasheet.octopart.com/EVQ-P7A01P-Panasonic-datasheet-98950114.pdf?src-supplier=Future+Electronics; ComponentLink8Description: https://datasheet.octopart.com/EVQ-P7A01P-Panasonic-datasheet-98950114.pdf?src-supplier=Future+Electronics; ComponentLink9URL: https://www3.panasonic.biz/ac/e_download/control/switch/light-touch/catalog/sw_lt_eng_3529s_side.pdf?src-supplier=Mouser; ComponentLink9Description: https://www3.panasonic.biz/ac/e_download/control/switch/light-touch/catalog/sw_lt_eng_3529s_side.pdf?src-supplier=Mouser; ComponentLink10URL: https://www3.panasonic.biz/ac/e_download/control/switch/light-touch/catalog/sw_lt_eng_3529s_side.pdf?src-supplier=Allied+Electronics; ComponentLink10Description: https://www3.panasonic.biz/ac/e_download/control/switch/light-touch/catalog/sw_lt_eng_3529s_side.pdf?src-supplier=Allied+Electronics; ComponentLink11URL: http://datasheet.octopart.com/EVQ-P7A01P-Panasonic-datasheet-98950114.pdf?src-supplier=Future+Electronics; ComponentLink11Description: http://datasheet.octopart.com/EVQ-P7A01P-Panasonic-datasheet-98950114.pdf?src-supplier=Future+Electronics; ComponentLink12URL: http://datasheet.octopart.com/EVQ-P7A01P-Panasonic-datasheet-98950114.pdf?src-supplier=Distrelec; ComponentLink12Description: http://datasheet.octopart.com/EVQ-P7A01P-Panasonic-datasheet-98950114.pdf?src-supplier=Distrelec; ComponentLink13URL: http://datasheet.octopart.com/EVQ-P7A01P-Panasonic-datasheet-98950114.pdf?src-supplier=Farnell; ComponentLink13Description: http://datasheet.octopart.com/EVQ-P7A01P-Panasonic-datasheet-98950114.pdf?src-supplier=Farnell; ComponentLink14URL: http://www.farnell.com/datasheets/1790605.pdf?src-supplier=Element14; ComponentLink14Description: http://www.farnell.com/datasheets/1790605.pdf?src-supplier=Element14; ComponentLink15URL: http://industrial.panasonic.com/www-data/pdf/ATK0000/ATK0000CE20.pdf?src-supplier=Farnell; ComponentLink15Description: http://industrial.panasonic.com/www-data/pdf/ATK0000/ATK0000CE20.pdf?src-supplier=Farnell; ComponentLink16URL: http://datasheet.octopart.com/EVQ-P7A01P-Panasonic-datasheet-98950114.pdf?src-supplier=Newark; ComponentLink16Description: http://datasheet.octopart.com/EVQ-P7A01P-Panasonic-datasheet-98950114.pdf?src-supplier=Newark; ComponentLink17URL: https://datasheet.octopart.com/EVQ-P7A01P-Panasonic-datasheet-22087671.pdf?src-supplier=Electro+Sonic; ComponentLink17Description: https://datasheet.octopart.com/EVQ-P7A01P-Panasonic-datasheet-22087671.pdf?src-supplier=Electro+Sonic; ComponentLink18URL: http://datasheet.octopart.com/EVQ-P7A01P-Panasonic-datasheet-98950114.pdf?src-supplier=Quest; ComponentLink18Description: http://datasheet.octopart.com/EVQ-P7A01P-Panasonic-datasheet-98950114.pdf?src-supplier=Quest; ComponentLink19URL: https://www3.panasonic.biz/ac/e_download/control/switch/light-touch/catalog/sw_lt_eng_3529s_side.pdf?src-supplier=TTI; ComponentLink19Description: https://www3.panasonic.biz/ac/e_download/control/switch/light-touch/catalog/sw_lt_eng_3529s_side.pdf?src-supplier=TTI; ComponentLink20URL: https://www3.panasonic.biz/ac/e_download/control/switch/light-touch/catalog/sw_lt_eng_3529s_side.pdf?src-supplier=NAC+Semi; ComponentLink20Description: https://www3.panasonic.biz/ac/e_download/control/switch/light-touch/catalog/sw_lt_eng_3529s_side.pdf?src-supplier=NAC+Semi; LCSC Part Number: C79167
footprint EVQP7A01P
pins: 1, 2

## EVQ-P2402W
designator SW?
SWITCH TACTILE SPST-NO 0.02A 15V; Manufacturer: Panasonic; Manufacturer Part Number: EVQ-P2402W; Item Type: Tactile Switches; Supplier: Mouser; Supplier Part Number: 667-EVQ-P2402W; RoHS: Yes; Stock: 23896; Pricing: 1=0.71, 10=0.654, 50=0.654, 100=0.518, 1000=0.414, 10000=0.335 (USD); ComponentLink1URL: https://datasheet.ciiva.com/25603/0900766b810ad3e5-25603951.pdf?src-supplier=Rs; ComponentLink1Description: https://datasheet.ciiva.com/25603/0900766b810ad3e5-25603951.pdf?src-supplier=Rs; ComponentLink2URL: https://datasheet.ciiva.com/8166/atv0000ce7-8166415.pdf?src-supplier=Avnet; ComponentLink2Description: https://datasheet.ciiva.com/8166/atv0000ce7-8166415.pdf?src-supplier=Avnet; ComponentLink3URL: https://datasheet.ciiva.com/2901/atk0000ce6-2901462.pdf?src-supplier=Digikey; ComponentLink3Description: https://datasheet.ciiva.com/2901/atk0000ce6-2901462.pdf?src-supplier=Digikey; ComponentLink4URL: https://datasheet.ciiva.com/2901/atk0000ce6-2901463.pdf?src-supplier=Digikey; ComponentLink4Description: https://datasheet.ciiva.com/2901/atk0000ce6-2901463.pdf?src-supplier=Digikey; ComponentLink5URL: https://datasheet.ciiva.com/2901/atk0000ce6-2901464.pdf?src-supplier=Digikey; ComponentLink5Description: https://datasheet.ciiva.com/2901/atk0000ce6-2901464.pdf?src-supplier=Digikey; ComponentLink6URL: https://datasheet.ciiva.com/30238/atv0000ce7-30238297.pdf?src-supplier=Onlinecomponents.com; ComponentLink6Description: https://datasheet.ciiva.com/30238/atv0000ce7-30238297.pdf?src-supplier=Onlinecomponents.com
footprint EVQ-P2402W
pins: 1, 2, 3, 4

## EVQ-PT5A15
designator SW?
SWITCH TACTILE SPST-NO 0.02A 15V; Manufacturer: Panasonic; Manufacturer Part Number: EVQ-PT5A15; Item Type: Tactile Switches; Contact Current Rating: 20mA; Contact Resistance: 50mR; Number of Positions: 2NUMBER; Supplier: Mouser; LCSC Part Number: C2915179; RoHS: Yes; Stock: 9099; Pricing: 1=0.44, 10=0.429, 50=0.429, 100=0.348, 1000=0.272, 10000=0.214 (USD); ComponentLink1URL: https://datasheet.ciiva.com/46408/1821219-46408618.pdf?src-supplier=Element14; ComponentLink1Description: https://datasheet.ciiva.com/46408/1821219-46408618.pdf?src-supplier=Element14; ComponentLink2URL: https://datasheet.ciiva.com/46408/1821219-46408619.pdf?src-supplier=Element14; ComponentLink2Description: https://datasheet.ciiva.com/46408/1821219-46408619.pdf?src-supplier=Element14
footprint EVQ-PT5A15
pins: 1, 2, 3, 4, 5 GND (power), 6 GND (power)

## EVQ-PUA02K
designator SW?
SWITCH TACTILE SPST-NO 0.05A 12V; Manufacturer: Panasonic; Manufacturer Part Number: EVQ-PUA02K; Mechanical Life: 100000Cycles; Actuator Color: Black; Operating Force: 2.2N; Throw Configuration: SPST; Max Current Rating: 50mA; Contact Resistance: 500mR; Illumination Type: Non-Illuminated,Illuminated; Switch Travel: 0.3mm; Switch Function: Off-Mom; Number of Positions: 2NUMBER; Actuator Length: 1mm; Item Type: Tactile Switch; Supplier: Mouser; LCSC Part Number: C128539; RoHS: Yes; Category: Tactile Switches; Stock: 6621; Pricing: 1=0.52, 10=0.461, 50=0.461, 100=0.384, 1000=0.335, 10000=0.283 (USD); Mounting Technology: Surface Mount; Min Operating Temperature: -20°C; Max Operating Temperature: 70°C; Max Voltage Rating (DC): 12V; Termination: Gull Wing; Packaging: Tape and Reel; Package Quantity: 4000; Current Rating: 50mA; Voltage Rating (DC): 12V; Electrical Life: 100000Cycles; Contact Current Rating: 50mA; Orientation: Straight; Series: EVQPU; Length: 6.4mm; Depth: 4.5mm; Radiation Hardening: No; RoHS Compliant: Yes; ComponentLink1URL: https://datasheet.ciiva.com/30117/atv0000ce5-30117313.pdf?src-supplier=Onlinecomponents.com; ComponentLink1Description: https://datasheet.ciiva.com/30117/atv0000ce5-30117313.pdf?src-supplier=Onlinecomponents.com; ComponentLink2URL: https://datasheet.ciiva.com/26945/getdatasheetpartid-65575-26945772.pdf?src-supplier=Verical; ComponentLink2Description: https://datasheet.ciiva.com/26945/getdatasheetpartid-65575-26945772.pdf?src-supplier=Verical; ComponentLink3URL: https://datasheet.ciiva.com/7987/1679731-7987639.pdf?src-supplier=Element14; ComponentLink3Description: https://datasheet.ciiva.com/7987/1679731-7987639.pdf?src-supplier=Element14; ComponentLink4URL: https://datasheet.ciiva.com/8165/atv0000ce5-8165244.pdf?src-supplier=Avnet; ComponentLink4Description: https://datasheet.ciiva.com/8165/atv0000ce5-8165244.pdf?src-supplier=Avnet; ComponentLink5URL: https://datasheet.ciiva.com/2899/atv0000ce5-2899804.pdf?src-supplier=Digikey; ComponentLink5Description: https://datasheet.ciiva.com/2899/atv0000ce5-2899804.pdf?src-supplier=Digikey; ComponentLink6URL: https://datasheet.ciiva.com/2899/atv0000ce5-2899805.pdf?src-supplier=Digikey; ComponentLink6Description: https://datasheet.ciiva.com/2899/atv0000ce5-2899805.pdf?src-supplier=Digikey; ComponentLink7URL: https://datasheet.ciiva.com/2899/atv0000ce5-2899803.pdf?src-supplier=Digikey; ComponentLink7Description: https://datasheet.ciiva.com/2899/atv0000ce5-2899803.pdf?src-supplier=Digikey
footprint EVQPUA02K
pins: 1, 2, 3, 4

## FSM1LPATR
designator SW?
SWITCH TACTILE SPST-NO 0.05A 24V; Manufacturer: TE Connectivity; Manufacturer Part Number: FSM1LPATR; Package: Custom; LCSC Part Number: C6859601; Item Type: Switch; ComponentLink1Description: LCSC; ComponentLink1URL: https://www.lcsc.com/product-detail/Tact-switchs-Keypad-Switches_TE-Connectivity-FSM1LPATR_C6859601.html?s_z=n_FSM6JSMATR
footprint FSM1LPATR
pins: 1 COM, 2 COM, 3 NO, 4 NO, 5 SHIELD

## FSM6JSMATR
designator SW?
SWITCH TACTILE SPST-NO 0.05A 24V; Manufacturer: TE Connectivity Alcoswitch; Manufacturer Part Number: FSM6JSMATR; Item Type: Switches; Number of Positions: 2NUMBER; Supplier: Rs; LCSC Part Number: C6558197; RoHS: Yes; Stock: 735; RoHS Compliant: 5897YesNo; ComponentLink1URL: https://datasheet.ciiva.com/7097/1486952-7097325.pdf?src-supplier=Newark; ComponentLink1Description: https://datasheet.ciiva.com/7097/1486952-7097325.pdf?src-supplier=Newark; ComponentLink2URL: https://datasheet.ciiva.com/1530/1714712-1530976.pdf?src-supplier=Element14; ComponentLink2Description: https://datasheet.ciiva.com/1530/1714712-1530976.pdf?src-supplier=Element14; ComponentLink3URL: https://datasheet.ciiva.com/15184/getdatasheetpartid-167889-15184443.pdf?src-supplier=Verical; ComponentLink3Description: https://datasheet.ciiva.com/15184/getdatasheetpartid-167889-15184443.pdf?src-supplier=Verical; ComponentLink4URL: https://datasheet.ciiva.com/8082/eng-cs-1308111-1-switches-core-program-catalog-0308-8082682.pdf?src-supplier=Avnet; ComponentLink4Description: https://datasheet.ciiva.com/8082/eng-cs-1308111-1-switches-core-program-catalog-0308-8082682.pdf?src-supplier=Avnet
footprint FSM6JSMATR
pins: 1, 2, 3, 4

## GT-TB092B-H090-L1
designator SW?
With Bracket 5mm 12V 5.3mm Round Button No SPST 50mA Through Hole Tactile Switches ROHS; Manufacturer: G-Switch; Manufacturer Part Number: GT-TB092B-H090-L1; Item Type: Switch; Package: Plugin; LCSC Part Number: C5446822; ComponentLink1Description: LCSC; ComponentLink1URL: https://www.lcsc.com/product-detail/C5446822.html?s_z=n_GT-TB092B-H090-L1
footprint GT-TB092B-H090-L1
pins: 1, 2, 3, 4

## GT-TC025D-H0065-L1
designator SW?
No NO J pin 50mA 3mm 100MΩ 100000 12V 250gf@±30gf 2.6mm -30℃~+85℃ 0.65mm Black Round Button Brick nogging SPST SMD Tactile Switches ROHS; Manufacturer: G-Switch; Manufacturer Part Number: GT-TC025D-H0065-L1; ComponentLink1Description: LCSC; ComponentLink1URL: https://www.lcsc.com/product-detail/Tactile-Switches_G-Switch-GT-TC025D-H0065-L1_C778132.html; LCSC Part Number: C778132; Item Type: Tactile Switch
footprint GT-TC025D-H0065-L1.
pins: 1, 2, 3, 4

## GT-TC032A-H015-L1
designator SW?
None Without bracket 50mA 3.05mm 100000 Times 12V 160gf 2.5mm 1.5mm Round Button Standing paste SPST SMD Tactile Switches ROHS; Manufacturer: G-Switch; Manufacturer Part Number: GT-TC032A-H015-L1; Item Type: Switch; Package: SMD; LCSC Part Number: C843684; ComponentLink1Description: LCSC; ComponentLink1URL: https://www.lcsc.com/product-detail/Tactile-Switches_G-Switch-GT-TC032A-H015-L1_C843684.html?s_z=n_B3U-1000P
footprint GT-TC032A-H015-L1
pins: 1, 2

## GT-TC074E-H080-L1
designator SW?
No NO 50mA 100MΩ 100000 Times 12V 130gf@±30gf Brick nogging SPST SMD Tactile Switches ROHS; Manufacturer: G-Switch; Manufacturer Part Number: GT-TC074E-H080-L1; Package: SMD; LCSC Part Number: C963229; Item Type: Tactile Switch; ComponentLink1Description: LCSC; ComponentLink1URL: https://www.lcsc.com/product-detail/Tactile-Switches_G-Switch-GT-TC074E-H080-L1_C963229.html
footprint GT-TC074E-H080-L1
pins: 1, 2, 3, 4

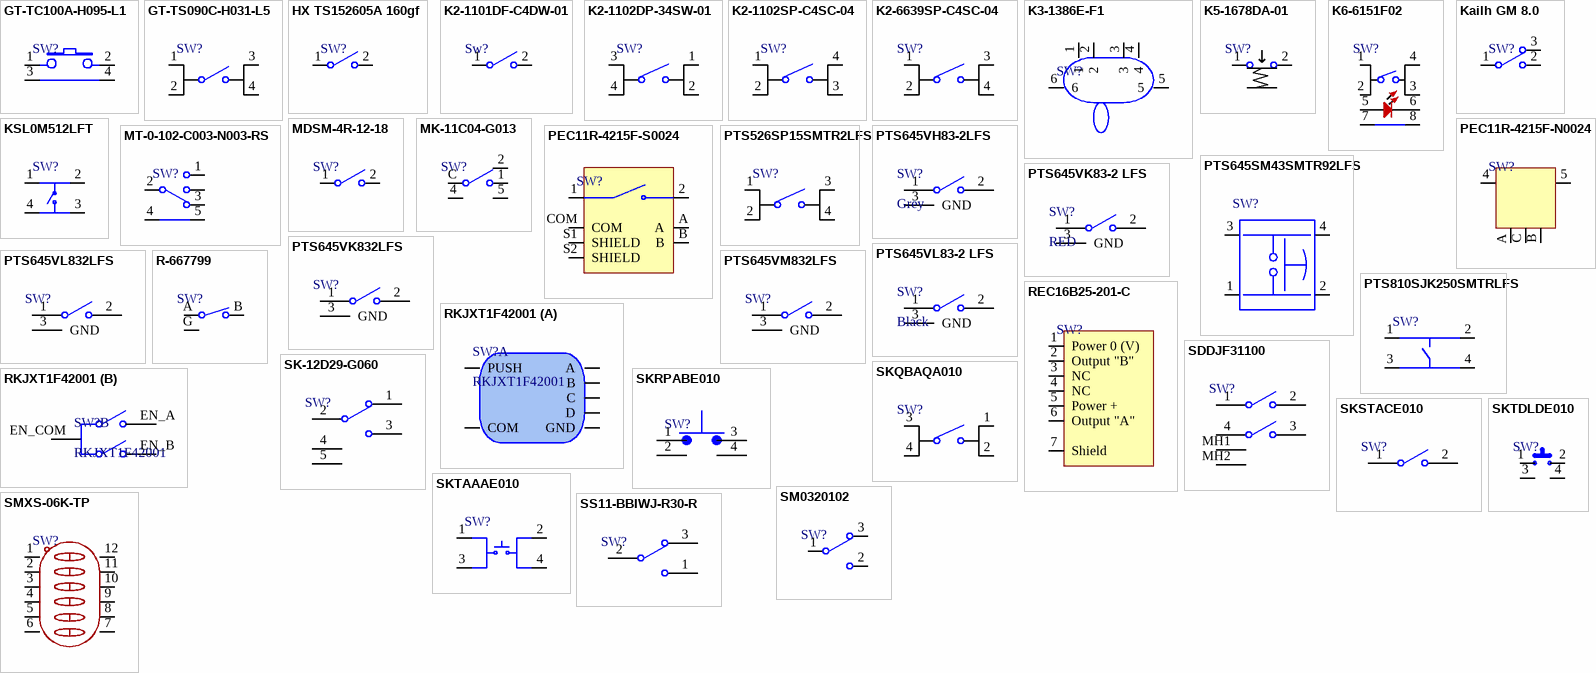
[diagram p1: symbols GT-TC100A-H095-L1 to SS11-BBIWJ-R30-R]

## GT-TC100A-H095-L1
designator SW?
None With bracket 50mA 7.3mm 100000 Times 12V 160gf 7.1mm 9.5mm Round Button Bend-in SPST Plugin Tactile Switches ROHS; Manufacturer: G-Switch; Manufacturer Part Number: GT-TC100A-H095-L1; Item Type: Switch; Package: Plugin; LCSC Part Number: C2829964; ComponentLink1Description: LCSC; ComponentLink1URL: https://www.lcsc.com/product-detail/Tactile-Switches_G-Switch-GT-TC100A-H095-L1_C2829964.html?s_z=n_GT-TC100A-H095-L1
footprint GT-TC100A-H095-L1
pins: 1, 2, 3 MH1, 4 MH2

## GT-TS090C-H031-L5
designator SW?
None Without 50mA 6.2mm 100MΩ 500,000 times 12V 100gf 6.2mm 3.1mm Round Button Standing paste SPST SMD Tactile Switches ROHS; Manufacturer: G-Switch; Manufacturer Part Number: GT-TS090C-H031-L5; Package: SMD; LCSC Part Number: C2686883; Item Type: Tactile Switch; ComponentLink1Description: LCSC; ComponentLink1URL: https://www.lcsc.com/product-detail/Tactile-Switches_G-Switch-GT-TS090C-H031-L5_C2686883.html
footprint GT-TS090C-H031-L5
pins: 1, 2, 3, 4

## HX TS152605A 160gf
designator SW?
No Without bracket 50mA 2.5mm 200,000 Times 1.6N 12V 1.6mm 0.55mm Vertical welding SPST SMD-4P,2.5x1.6mm Tactile Switches ROHS; Manufacturer: hanxia; Manufacturer Part Number: HX TS152605A 160gf; Item Type: Switch; Package: SMD-4P,2.5x1.6mm; LCSC Part Number: C25168822; ComponentLink1Description: LCSC; ComponentLink1URL: https://lcsc.com/product-detail/Tactile-Switches_hanxia-HX-TS152605A-160gf_C25168822.html
footprint HX TS152605A 160gf
pins: 1, 2

## K2-1101DF-C4DW-01
designator Sw?
50mA Lying 100MΩ 100000 Times 250gf@±30gf 12V Plugin Tactile Switches ROHS; Manufacturer: Korean Hroparts Elec; Manufacturer Part Number: K2-1101DF-C4DW-01; Package: Plugin; LCSC Part Number: C502329; Item Type: Tactile Switch; ComponentLink1Description: LCSC; ComponentLink1URL: https://www.lcsc.com/product-detail/Tactile-Switches_Korean-Hroparts-Elec-K2-1101DF-C4DW-01_C502329.html
footprint K2-1101DF-C4DW-01
pins: 1, 2

## K2-1102DP-34SW-01
designator SW?
6mm 17.5mm 50mA Straight 6mm 100MΩ 100,000 Times 250gf 12V Plugin Tactile Switches ROHS; Manufacturer: HRO Electronics; Manufacturer Part Number: K2-1102DP-34SW-01; Supplier: LCSC; LCSC Part Number: C879722; RoHS: No; Item Type: Tactile Switch
footprint K2-1102DP-34SW-01
pins: 1, 2, 3, 4

## K2-1102SP-C4SC-04
designator SW?
-25℃~+85℃ 6mm 5mm Round Button 50mA Brick nogging 6mm SPST 100MΩ 100000 250gf@±30gf 12V SMD Tactile Switches ROHS; Manufacturer: Korean Hroparts Elec; Manufacturer Part Number: K2-1102SP-C4SC-04; Item Type: Switch; Package: SMD; LCSC Part Number: C127509; ComponentLink1Description: LCSC; ComponentLink1URL: https://www.lcsc.com/product-detail/span-style-background-color-ff0-Tactile-span-Switches_Korean-Hroparts-Elec-K2-1102SP-C4SC-04_C127509.html
footprint K2-1102SP-C4SC-04
pins: 1, 2, 3, 4

## K2-6639SP-C4SC-04
designator SW?
50mA Brick nogging SPST 100MΩ 1000000 times 250gf@±30gf 12V SMD Tactile Switches ROHS; Manufacturer: Korean Hroparts Elec; Manufacturer Part Number: K2-6639SP-C4SC-04; LCSC Part Number: C83206; Package: SMD; Item Type: Tactile Switch; ComponentLink1Description: LCSC; ComponentLink1URL: https://www.lcsc.com/product-detail/Tactile-Switches_Korean-Hroparts-Elec-K2-6639SP-C4SC-04_C83206.html
footprint K2-6639SP-C4SC-04
pins: 1, 2, 3, 4

## K3-1386E-F1
designator SW?
300mA Horizontal attachment triple-pole/single-throw 4V Black 10,000 times SMD Slide Switches ROHS; Manufacturer: Korean Hroparts Elec; Manufacturer Part Number: K3-1386E-F1; Package: SMD; LCSC Part Number: C2690044; Item Type: Slide Switch; ComponentLink1Description: LCSC; ComponentLink1URL: https://www.lcsc.com/product-detail/Slide-Switches_Korean-Hroparts-Elec-K3-1386E-F1_C2690044.html
footprint K3-1386E-F1
pins: 1, 2, 3, 4, 5, 6

## K5-1678DA-01
designator SW?
1A 16V Detection switch 50000次 Plugin Microswitches ROHS; Manufacturer: Korean Hroparts Elec; Manufacturer Part Number: K5-1678DA-01; Package: Custom; LCSC Part Number: C2848627; Item Type: Switch; ComponentLink1Description: LCSC; ComponentLink1URL: https://www.lcsc.com/product-detail/Microswitches_Korean-Hroparts-Elec-K5-1678DA-01_C2848627.html
footprint K5-1678DA-01
pins: 1, 2

## K6-6151F02
designator SW?
Red 50mA Lying 100000 Times 160gf 12V Plugin Tactile Switches ROHS; Manufacturer: Korean Hroparts Elec; Manufacturer Part Number: K6-6151F02; Package: Custom; LCSC Part Number: C693802; Item Type: Tactile Switch; ComponentLink1Description: LCSC; ComponentLink1URL: https://www.lcsc.com/product-detail/Tactile-Switches_Korean-Hroparts-Elec-K6-6151F02_C693802.html
footprint K6-6151F02
pins: 1, 2, 3, 4, 5 L2, 6 L1, 7, 8

## Kailh GM 8.0
designator SW?
Mouse Micro Switch Micro Button Gold Contactor 80 Million Click Life 3 Pin Black Dot; Manufacturer: BUBM; Manufacturer Part Number: Kailh GM 8.0; Item Type: Mouse Micro Switch; ComponentLink1Description: Aliexpress; ComponentLink1URL: https://www.aliexpress.us/item/1005002924855895.html?src=google&aff_fcid=ad5357f989ae4d55a39ac9f553db9485-1707458397787-02282-UneMJZVf&aff_fsk=UneMJZVf&aff_platform=aaf&sk=UneMJZVf&aff_trace_key=ad5357f989ae4d55a39ac9f553db9485-1707458397787-02282-UneMJZVf&terminal_id=14374b2a675b4e7980ac1e468ba6c092&afSmartRedirect=y&gatewayAdapt=4itemAdapt#nav-description
footprint Kailh GM 8.0
pins: 1 COM, 2 NO, 3 NC

## KSL0M512LFT
designator SW?
SWITCH TACTILE SPST-NO 0.05A 32V; Manufacturer: ITT C&K; Manufacturer Part Number: KSL0M512LFT; Item Type: Tactile Switches; Supplier: Digikey; Supplier Part Number: 401-1837-ND; RoHS: Yes; Stock: 9888; Pricing: 1=0.84, 10=0.718, 25=0.6684, 100=0.5961, 250=0.55216, 500=0.52152, 1000=0.49338, 2500=0.46016, 5000=0.43804 (USD); ComponentLink1URL: https://datasheet.ciiva.com/2901/ksa-ksl-mkii-2901962.pdf?src-supplier=Digikey; ComponentLink1Description: https://datasheet.ciiva.com/2901/ksa-ksl-mkii-2901962.pdf?src-supplier=Digikey
footprint KSL0M512 LFT
pins: 1, 2, 3, 4

## MDSM-4R-12-18
designator SW?
SWITCH REED SPST-NO 350MA 140V; Manufacturer: Littelfuse; Manufacturer Part Number: MDSM-4R-12-18; Contact Current Rating: 500mA; Supplier: Digi-Key; Supplier Part Number: HE151CT-ND; RoHS: Yes; Category: Switches; Stock: 229031; Pricing: 1=0.97, 10=0.932, 25=0.8712, 100=0.7565, 250=0.6884, 500=0.6603 (USD); Pins: 2NUMBER; Height: 2.84mm; ComponentLink1URL: https://datasheet.ciiva.com/26852/getdatasheetpartid-422080-26852456.pdf?src-supplier=Verical; ComponentLink1Description: https://datasheet.ciiva.com/26852/getdatasheetpartid-422080-26852456.pdf?src-supplier=Verical; ComponentLink2URL: https://datasheet.ciiva.com/16451/mdsm-4-16451549.pdf?src-supplier=Future+Electronics; ComponentLink2Description: https://datasheet.ciiva.com/16451/mdsm-4-16451549.pdf?src-supplier=Future+Electronics; ComponentLink3URL: https://datasheet.ciiva.com/29124/mdsm-4r-29124540.pdf?src-supplier=Digi-Key; ComponentLink3Description: https://datasheet.ciiva.com/29124/mdsm-4r-29124540.pdf?src-supplier=Digi-Key; ComponentLink4URL: https://datasheet.ciiva.com/29124/mdsm-4r-29124541.pdf?src-supplier=Digi-Key; ComponentLink4Description: https://datasheet.ciiva.com/29124/mdsm-4r-29124541.pdf?src-supplier=Digi-Key; ComponentLink5URL: https://datasheet.ciiva.com/29124/mdsm-4r-29124542.pdf?src-supplier=Digi-Key; ComponentLink5Description: https://datasheet.ciiva.com/29124/mdsm-4r-29124542.pdf?src-supplier=Digi-Key
footprint MDSM-4R-12-18
pins: 1, 2

## MK-11C04-G013
designator SW?
Surface Mount 1A SPDT 6V Black 10000次 SMD Slide Switches ROHS; Manufacturer: G-Switch; Manufacturer Part Number: MK-11C04-G013; Package: SMD; LCSC Part Number: C778185; Item Type: Slide Switche; ComponentLink1Description: LCSC; ComponentLink1URL: https://www.lcsc.com/product-detail/Slide-Switches_G-Switch-MK-11C04-G013_C778185.html
footprint MK-11C04-G013
pins: 1, 2, 4 MP, 5 MP, C